# Altium footprint library John_W.PcbLib: 35 footprints (part 1 of 3)
Each footprint in its own frame and in the unit in brackets; x right, y up, seen from the top. Pads: shape width x height; smd on the part's side, far side on the other; paste and mask are expansions set on the pad; w line width, h text height; cw(c..) or ccw(c..) is an arc to the next point about the centre after c.
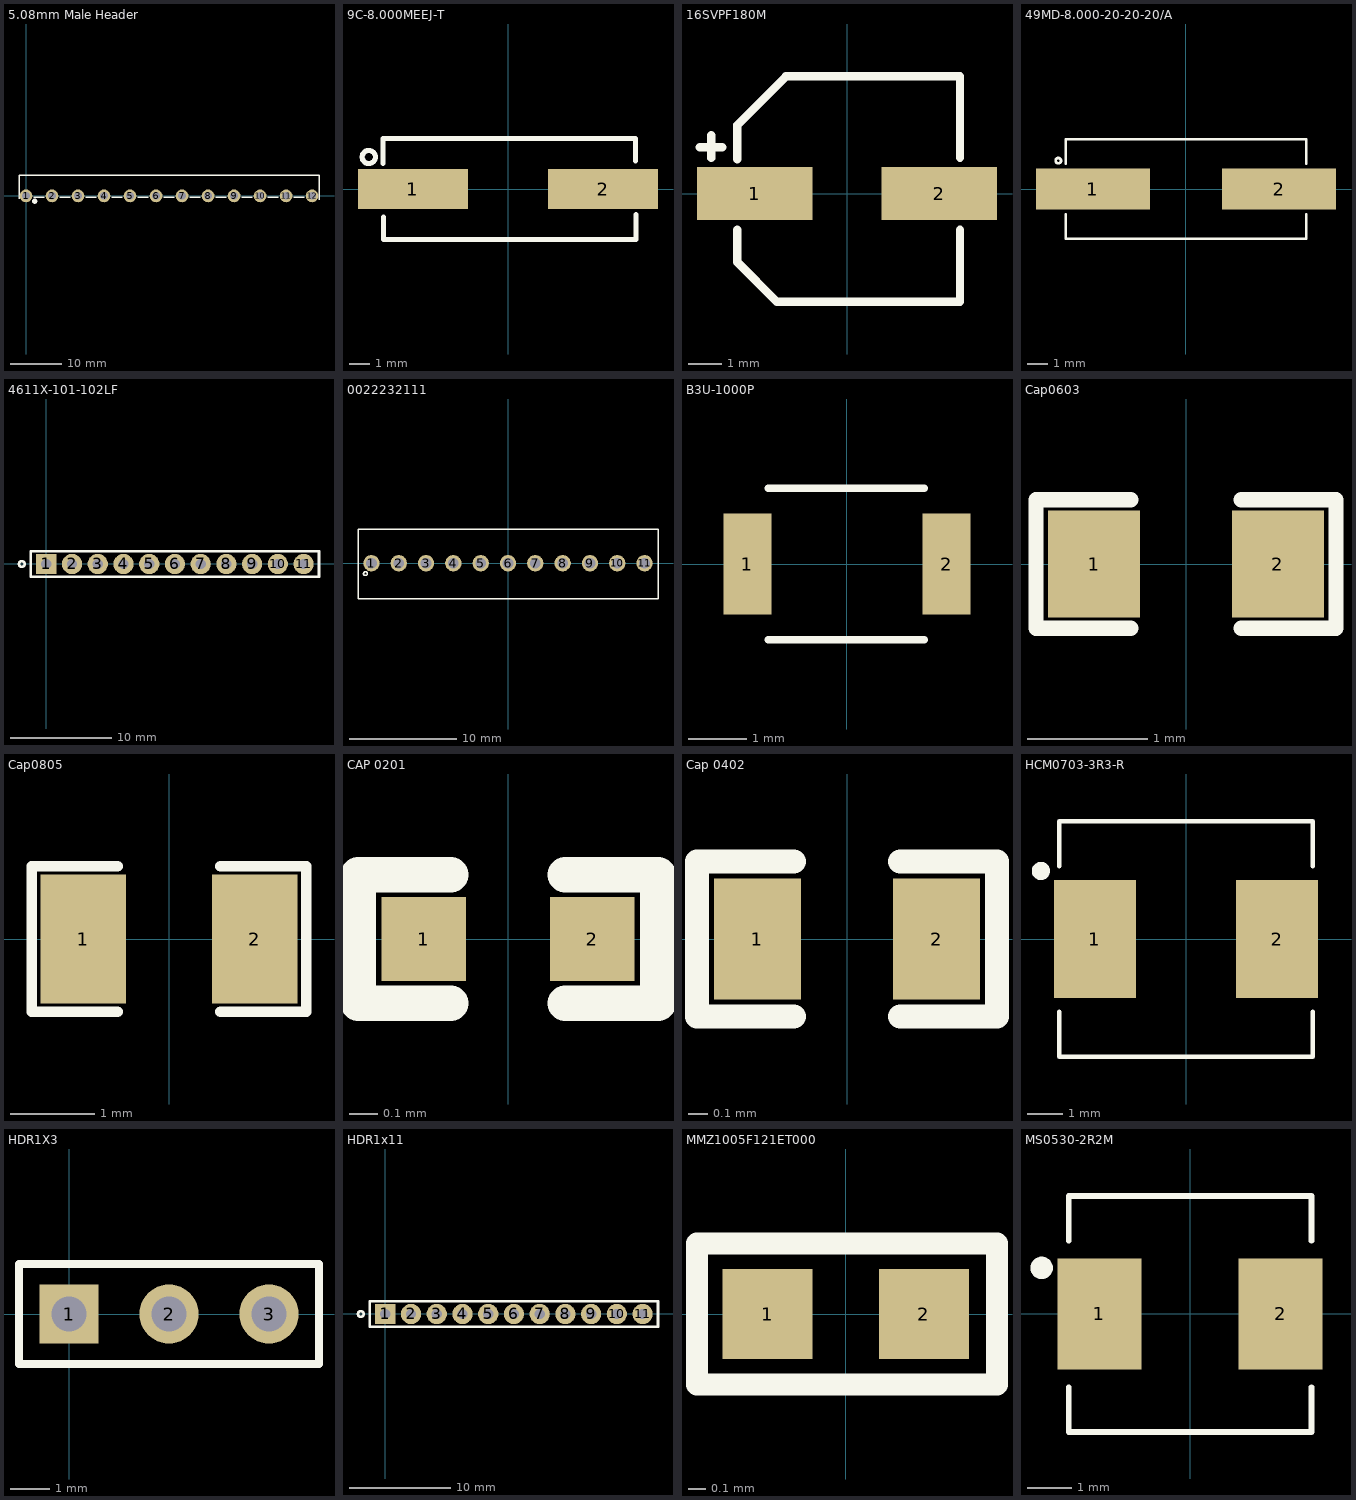
[diagram p0: the footprints below, top view; thin cyan lines are the x and y axes]

## 5.08mm Male Header [mm] "5.08mm right angle single row pin header connector"
pads (12):
  round 2.5 hole 1.5: 1(0,0) 2(5.08,0) 3(10.16,0) 4(15.24,0) 5(20.32,0) 6(25.4,0) 7(30.48,0) 8(35.56,0) 9(40.64,0) 10(45.72,0) 11(50.8,0) 12(55.88,0)
Top Overlay:
  circle w0.5: c1.702,-1.041 r0.254
  lines w0.254: -1.372,-0.584 -1.372,3.988 57.226,3.988 57.226,-0.711 ; 1.499,-0.279 3.556,-0.279 ; 6.579,-0.279 8.636,-0.279 ; 11.659,-0.279 13.716,-0.279 ; 16.739,-0.279 18.796,-0.279 ; 21.819,-0.279 23.876,-0.279 ; 26.899,-0.279 28.956,-0.279 ; 31.979,-0.279 34.036,-0.279 ; 37.059,-0.279 39.116,-0.279 ; 42.139,-0.279 44.196,-0.279 ; 47.219,-0.279 49.276,-0.279 ; 52.299,-0.279 54.356,-0.279
3D body "HTSW-212-08-S-S-RA.stp": height 4.02, standoff -1.31, extent -1.27,-0.273 57.15,9.951

## 9C-8.000MEEJ-T [mm] "CRYSTAL 8.0000MHZ 18PF SMD"
pads (2):
  rect 5.5x2 smd: 1(-4.75,0) 2(4.75,0)
Top Overlay:
  circle w0.254: c-6.96,1.6 r0.331
  lines w0.254: -6.248,1.27 -6.248,2.515 6.375,2.515 6.375,1.397 ; -6.223,-1.397 -6.223,-2.515 6.401,-2.515 6.401,-1.27
3D body "User Library-HC-49S.step": height 4.36, standoff 0.01, extent -6.074,-2.35 6.226,2.35

## 16SVPF180M [mm]
pads (2):
  rect 3.5x1.6 smd: 1(-2.8,0) 2(2.8,0)
Top Overlay:
  lines w0.254: -4.47,1.41 -3.785,1.41 ; -4.115,1.079 -4.115,1.765 ; -3.327,-1.092 -3.327,-2.083 -2.134,-3.277 3.429,-3.277 3.429,-1.092 ; -3.327,1.041 -3.327,2.083 -1.854,3.556 3.429,3.556 3.429,1.092
3D body "70324302.stp": height 6, standoff 0, extent -3.255,-3.15 3.345,3.45

## 49MD-8.000-20-20-20/A [mm]
pads (2):
  rect 5.5x2 smd: 1(-4.5,0) 2(4.5,0)
Top Overlay:
  circle w0.127: c-6.172,1.372 r0.13
  lines w0.127: -5.817,-1.219 -5.817,-2.413 5.817,-2.413 5.817,-1.219 ; -5.817,1.219 -5.817,2.413 5.817,2.413 5.817,1.219
3D body "User Library-HC49US.STEP": height 4.2, standoff 0, extent -6.375,-2.337 6.325,2.363

## 4611X-101-102LF [mm]
pads (11):
  rect 2x2 hole 1.02: 1(0,0)
  round 2 hole 1.02: 2(2.54,0) 3(5.08,0) 4(7.62,0) 5(10.16,0) 6(12.7,0) 7(15.24,0) 8(17.78,0) 9(20.32,0) 10(22.86,0) 11(25.4,0)
Top Overlay:
  circle w0.254: c-2.413,0 r0.284
  lines w0.254: -1.524,-1.27 -1.524,1.27 26.924,1.27 26.924,-1.27 -1.524,-1.27
3D body "4611x.stp": height 4.95, standoff -3.43, extent -1.245,-1.214 26.645,1.27

## 0022232111 [mil]
pads (11):
  round 60 hole 39.37: 1(-500,0) 2(-400,0) 3(-300,0) 4(-200,0) 5(-100,0) 6(0,0) 7(100,0) 8(200,0) 9(300,0) 10(400,0) 11(500,0)
Top Overlay:
  circle w5: c-522,-38 r7.07
  lines w5: -549,-130 -549,124 549,124 549,-130 -549,-130
3D body "022232111.stp": height 436.24, standoff -123.76, extent -547,-128 547,122

## B3U-1000P [mm] "SWITCH TACTILE SPST-NO 0.05A 12V"
pads (2):
  rect 0.82x1.72 smd: 1(-1.7,0) 2(1.7,0)
Top Overlay:
  lines w0.127: -1.346,-1.295 0,-1.295 1.321,-1.295 ; -1.346,1.295 0,1.295 1.321,1.295
3D body "User Library-OMRON B3U1000P.step": height 1.6, standoff 0, extent -2,-1.263 2,1.237

## Cap0603 [mil]
pads (2):
  rect 30x35 smd mask+2.36: 1(-30,0) 2(30,0)
Top Overlay:
  lines w5: -18,-21 -49,-21 -49,21 -18,21 ; 18,-21 49,-21 49,21 18,21
3D body "User Library-CAPC1608X09.step": height 34.25, standoff -1.18, extent -31.51,-15.75 31.49,15.74

## Cap0805 [mil] "SMD 0805"
pads (2):
  rect 40x60 smd mask+2.76: 1(-40,0) 2(40,0)
Top Overlay:
  lines w5: -24,-34 -64,-34 -64,34 -24,34 ; 24,-34 64,-34 64,34 24,34
3D body "User Library-0805 SMD Capacitor.step": height 30, standoff -0.79, extent -39.36,-24.6 39.38,24.61

## CAP 0201 [mm]
pads (2):
  rect 0.3x0.3 smd mask+0.055: 1(-0.3,0) 2(0.3,0)
Top Overlay:
  lines w0.127: -0.203,-0.229 -0.533,-0.229 -0.533,0.229 -0.203,0.229 ; 0.203,-0.229 0.533,-0.229 0.533,0.229 0.203,0.229
3D body "User Library-SMD Ceramic Capacitors_0201 (0603)_AB.STEP": height 0.28, standoff -0.02, extent -0.3,-0.15 0.301,0.15

## Cap 0402 [mil]
pads (2):
  rect 18x25 smd mask+2.36: 1(-18.5,0) 2(18.5,0)
Top Overlay:
  lines w5: -11,-16 -31,-16 -31,16 -11,16 ; 11,-16 31,-16 31,16 11,16
3D body "User Library-Capacitor 0402.step": height 18.5, standoff -1.18, extent -19.68,-9.84 19.7,9.85

## HCM0703-3R3-R [mm]
pads (2):
  rect 2.3x3.3 smd: 1(-2.55,0) 2(2.55,0)
Top Overlay:
  circle w0.254: c-4.064,1.905 r0.127
  lines w0.127: -3.55,-2.032 -3.55,-3.3 3.55,-3.3 3.55,-2.032 ; -3.55,2.032 -3.55,3.3 3.55,3.3 3.55,2.032
3D body "HCM0703-R.STEP": height 3, standoff 0, extent -3.55,-3.3 3.55,3.3

## HDR1X3 [mm] "Connector; Header; 3 Position"
pads (3):
  rect 1.5x1.5 hole 0.9: 1(0,0)
  round 1.5 hole 0.9: 2(2.54,0) 3(5.08,0)
Top Overlay:
  lines w0.2: -1.27,-1.27 -1.27,1.27 6.35,1.27 6.35,-1.27 -1.27,-1.27
3D body "User Library-Header_Male_3Pin.STEP": height 8.54, standoff -3, extent -1.27,-1.245 6.35,1.245

## HDR1x11 [mm]
pads (11):
  rect 2x2 hole 1.02: 1(0,0)
  round 2 hole 1.02: 2(2.54,0) 3(5.08,0) 4(7.62,0) 5(10.16,0) 6(12.7,0) 7(15.24,0) 8(17.78,0) 9(20.32,0) 10(22.86,0) 11(25.4,0)
Top Overlay:
  circle w0.254: c-2.413,0 r0.284
  lines w0.254: -1.524,-1.27 26.924,-1.27 26.924,1.27 -1.524,1.27 -1.524,-1.27
3D body "_ _ _C111LFBN-RC.STEP": height 8.5, standoff -3.2, extent -1.524,-1.27 26.916,1.27

## MMZ1005F121ET000 [mm]
pads (2):
  rect 0.52x0.52 smd: 1(-0.45,0) 2(0.45,0)
Top Overlay:
  lines w0.127: -0.856,-0.406 0.871,-0.406 0.871,0.406 -0.856,0.406 -0.856,-0.406
3D body "IND_1005.step": height 0.5, standoff 0, extent -0.5,-0.3 0.5,0.3

## MS0530-2R2M [mm]
pads (2):
  rect 1.895x2.5 smd: 1(-2.047,0) 2(2.048,0)
Top Overlay:
  circle w0.254: c-3.353,1.041 r0.127
  lines w0.127: -2.743,-1.651 -2.743,-2.667 2.743,-2.667 2.743,-1.651 ; -2.743,1.651 -2.743,2.667 2.743,2.667 2.743,1.651
3D body "SRP5030TA.stp": height 2.81, standoff 0, extent -2.85,-2.6 2.85,2.6